# Altium footprint library 2.41-LGA封装.PcbLib: 4 footprints
Each footprint in its own frame and in the unit in brackets; x right, y up, seen from the top. Pads: shape width x height; smd on the part's side, far side on the other; paste and mask are expansions set on the pad; w line width, h text height; cw(c..) or ccw(c..) is an arc to the next point about the centre after c.
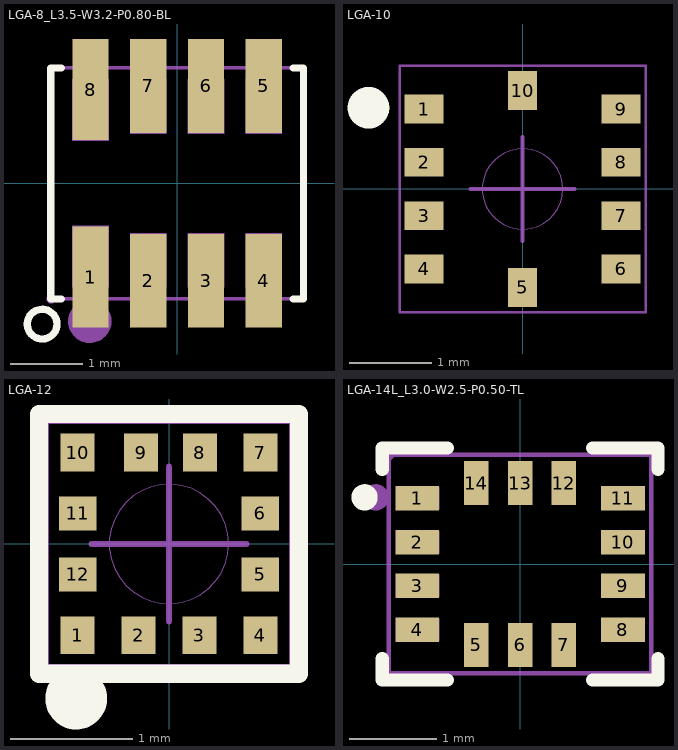
[diagram p0: the footprints below, top view; thin cyan lines are the x and y axes]

## LGA-8_L3.5-W3.2-P0.80-BL [mm]
pads (8):
  rect 0.5x1.4 smd paste+0 mask+0.05: 1(-1.2,-1.3) 8(-1.2,1.3)
  rect 0.5x1.3 smd paste+0 mask+0.05: 2(-0.4,-1.35) 3(0.4,-1.35) 4(1.2,-1.35) 5(1.2,1.35) 6(0.4,1.35) 7(-0.4,1.35)
Top Overlay:
  circle w0.1: c-1.87,-1.95 r0.206
  lines w0.1: -1.604,-1.6 -1.75,-1.6 -1.75,1.6 -1.604,1.6 ; 1.604,-1.6 1.75,-1.6 1.75,1.6 1.604,1.6
Mechanical 6:
  circle w0.3: c-1.21,-1.91 r0.15
Mechanical 15:
  region: -1.69,-1.6 -1.69,-1.625 -1.725,-1.66 -1.775,-1.66 -1.81,-1.625 -1.81,-1.6 -1.81,-1.575 -1.775,-1.54 -1.725,-1.54 -1.69,-1.575 -1.69,-1.6
  region: -1.45,0.59 -1.45,1.44 -0.95,1.44 -0.95,0.59
  region: -0.65,-1.44 -0.65,-0.69 -0.15,-0.69 -0.15,-1.44
  region: -1.45,-1.44 -1.45,-0.59 -0.95,-0.59 -0.95,-1.44
  region: 0.15,-1.44 0.15,-0.69 0.65,-0.69 0.65,-1.44
  region: 0.95,-1.44 0.95,-0.69 1.45,-0.69 1.45,-1.44
  region: -0.15,1.44 -0.15,0.69 -0.65,0.69 -0.65,1.44
  region: 0.65,1.44 0.65,0.69 0.15,0.69 0.15,1.44
  region: 1.45,1.44 1.45,0.69 0.95,0.69 0.95,1.44
  lines w0.051: -1.75,-1.6 -1.75,1.6 1.75,1.6 1.75,-1.6 -1.75,-1.6
3D body "U1~LGA-8_L3.5-W3.2-P0.80-BL~LGA-8_L3.5-W3.2-P0.80-BL~Rt9Q.STEP": height 1.01, standoff 0, extent -1.75,-1.6 1.75,1.6

## LGA-10 [mm] "3X3mm"
height 0.9
pads (10):
  rect 0.475x0.35 smd mask+0.07: 1(-1.2,0.975) 2(-1.2,0.325) 3(-1.2,-0.325) 4(-1.2,-0.975) 6(1.2,-0.975) 7(1.2,-0.325) 8(1.2,0.325) 9(1.2,0.975)
  rect 0.35x0.475 smd mask+0.07: 5(0,-1.2) 10(0,1.2)
Top Overlay:
  circle w0.254: c-1.88,0.991 r0.127
Top Solder:
  region: -1.27,-1.524 -1.524,-1.524 -1.524,-1.27 -1.651,-1.27 -1.651,-1.651 -1.27,-1.651
  region: 1.524,-1.27 1.524,-1.524 1.27,-1.524 1.27,-1.651 1.651,-1.651 1.651,-1.27
  region: 1.27,1.524 1.524,1.524 1.524,1.27 1.651,1.27 1.651,1.651 1.27,1.651
  region: -1.524,1.27 -1.524,1.524 -1.27,1.524 -1.27,1.651 -1.651,1.651 -1.651,1.27
Mechanical 14:
  circle w0.01: c0,0 r0.491
  lines w0.05: -0.635,0 0.635,0 ; 0,-0.635 0,0.635
Mechanical 15:
  lines w0.03: -1.5,-1.5 1.5,-1.5 1.5,1.5 -1.5,1.5 -1.5,-1.5
3D body "kxtj9.stp": height 0.91, standoff 0, extent -1.5,-1.5 1.5,1.5

## LGA-12 [mm] "2X2mm"
height 0.8
pads (12):
  rect 0.28x0.31 smd mask+0.07: 1(-0.75,-0.75) 2(-0.25,-0.75) 3(0.25,-0.75) 4(0.75,-0.75) 7(0.75,0.75) 8(0.254,0.75) 9(-0.229,0.75) 10(-0.75,0.75)
  rect 0.31x0.28 smd mask+0.07: 5(0.75,-0.25) 6(0.75,0.25) 11(-0.75,0.25) 12(-0.75,-0.25)
Top Overlay:
  circle w0.254: c-0.762,-1.27 r0.127
  lines w0.15: -1.067,-1.067 -1.067,1.067 1.067,1.067 1.067,-1.067 -1.067,-1.067
Mechanical 14:
  circle w0.01: c0,0 r0.491
  lines w0.05: -0.635,0 0.635,0 ; 0,-0.635 0,0.635
Mechanical 15:
  lines w0.03: -1,-1 -1,1 1,1 1,-1 -1,-1
3D body "qfn-12.stp": height 0.96, standoff 0, extent -1,-1 1,1

## LGA-14L_L3.0-W2.5-P0.50-TL [mm]
pads (14):
  rect 0.5x0.28 smd: 1(-1.175,0.75) 2(-1.175,0.25) 3(-1.175,-0.25) 4(-1.175,-0.75) 8(1.175,-0.75) 9(1.175,-0.25) 10(1.175,0.25) 11(1.175,0.75)
  rect 0.28x0.5 smd: 5(-0.5,-0.925) 6(0,-0.925) 7(0.5,-0.925) 12(0.5,0.925) 13(0,0.925) 14(-0.5,0.925)
Top Overlay:
  circle w0.15: c-1.778,0.762 r0.075
  lines w0.152: -1.576,-1.08 -1.576,-1.326 -0.831,-1.326 ; -1.576,1.08 -1.576,1.326 -0.831,1.326 ; 0.831,-1.326 1.576,-1.326 1.576,-1.08 ; 0.831,1.326 1.576,1.326 1.576,1.08
Mechanical 6:
  circle w0.15: c-1.651,0.762 r0.075
Mechanical 15:
  region: -1.44,1.25 -1.44,1.225 -1.475,1.19 -1.525,1.19 -1.56,1.225 -1.56,1.25 -1.56,1.275 -1.525,1.31 -1.475,1.31 -1.44,1.275 -1.44,1.25
  region: 0.925,0.625 0.925,0.875 1.4,0.875 1.4,0.625
  region: 0.925,0.125 0.925,0.375 1.4,0.375 1.4,0.125
  region: 0.925,-0.375 0.925,-0.125 1.4,-0.125 1.4,-0.375
  region: 0.925,-0.875 0.925,-0.625 1.4,-0.625 1.4,-0.875
  region: -1.4,-0.875 -1.4,-0.625 -0.925,-0.625 -0.925,-0.875
  region: -1.4,-0.375 -1.4,-0.125 -0.925,-0.125 -0.925,-0.375
  region: -1.4,0.125 -1.4,0.375 -0.925,0.375 -0.925,0.125
  region: -1.4,0.625 -1.4,0.875 -0.925,0.875 -0.925,0.625
  region: -0.625,0.675 -0.625,1.15 -0.375,1.15 -0.375,0.675
  region: -0.125,0.675 -0.125,1.15 0.125,1.15 0.125,0.675
  region: 0.375,0.675 0.375,1.15 0.625,1.15 0.625,0.675
  region: 0.375,-1.15 0.375,-0.675 0.625,-0.675 0.625,-1.15
  region: -0.125,-1.15 -0.125,-0.675 0.125,-0.675 0.125,-1.15
  region: -0.625,-1.15 -0.625,-0.675 -0.375,-0.675 -0.375,-1.15
  lines w0.051: -1.5,-1.25 1.5,-1.25 1.5,1.25 -1.5,1.25 -1.5,-1.25
3D body "LGA-14L_L3.0-W2.5-P0.50.STEP": height 0.92, standoff 0, extent -1.5,-1.25 1.5,1.25